# Altium schematic symbol library TL431.SchLib: 1 symbol
Pins are listed as number, name and electrical type; pins without a type are passive.

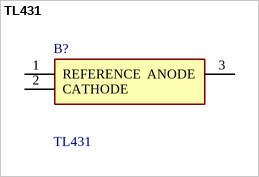
[diagram p0: symbol TL431]

## TL431
designator B?
ON Semiconductor ANA 2.5V PROG SHUNT REF; Manufacturer_Name: onsemi; Geometry.Height: 1.2mm; Manufacturer_Part_Number: TL431; Mouser Part Number: N/A; Mouser Price/Stock: https://www.mouser.co.uk/ProductDetail/onsemi/TL431?qs=%252BEew9%252B0nqrAp2ClC6bEq7Q%3D%3D; Arrow Part Number: *; Arrow Price/Stock: *; Datasheet Link: https://datasheet.lcsc.com/szlcsc/Guangdong-Hottech-TL431_C181103.pdf
footprint SOT96P240X120-3N
pins: 1 REFERENCE, 2 CATHODE, 3 ANODE